# Altium schematic symbol library LM7805CT_NOPB.SchLib: 1 symbol
Pins are listed as number, name and electrical type; pins without a type are passive.

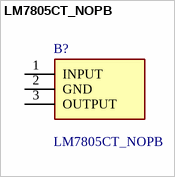
[diagram p0: symbol LM7805CT_NOPB]

## LM7805CT_NOPB
designator B?
1.5-A, Wide VIN Fixed Voltage Regulators; Manufacturer_Name: Texas Instruments; Manufacturer_Part_Number: LM7805CT/NOPB; Geometry.Height: 4.7mm; Mouser Part Number: 926-LM7805CT/NOPB; Mouser Price/Stock: https://www.mouser.co.uk/ProductDetail/Texas-Instruments/LM7805CT-NOPB?qs=OYMYEaN9QmBS2GvaX6GSkQ%3D%3D; Datasheet Link: http://www.ti.com/lit/gpn/lm7800
footprint TO254P470X1028X1955-3P
pins: 1 INPUT, 2 GND, 3 OUTPUT